# Altium footprint library MPD_BA4AAPC.PcbLib: 1 footprints
Each footprint in its own frame and in the unit in brackets; x right, y up, seen from the top. Pads: shape width x height; smd on the part's side, far side on the other; paste and mask are expansions set on the pad; w line width, h text height; cw(c..) or ccw(c..) is an arc to the next point about the centre after c.
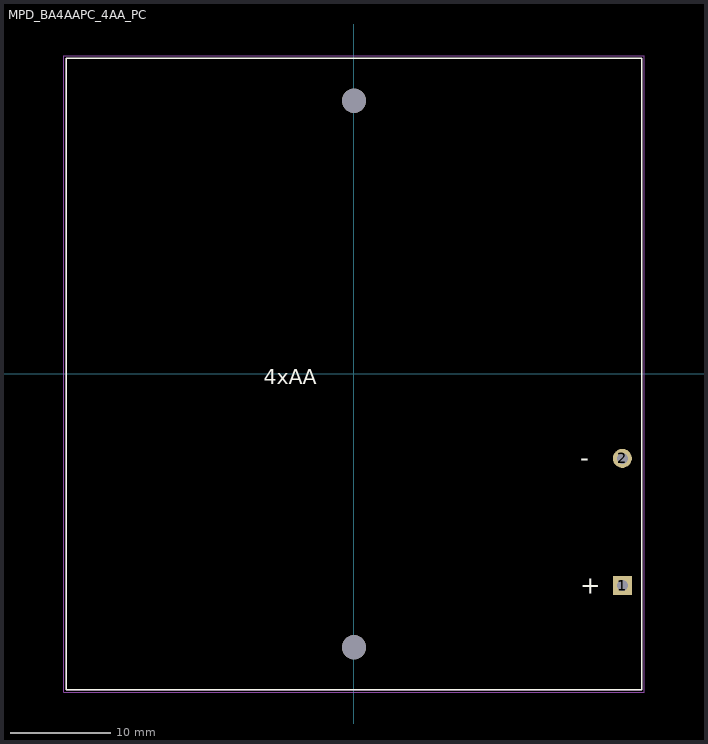
[diagram p0: the footprint, top view; thin cyan lines are the x and y axes]

## MPD_BA4AAPC_4AA_PC [mm] "MPD BA4AAPC 4xAA holder, PC pins (rev H PCB layout); pin 1 = pack +"
pads (4):
  rect 1.9x1.9 hole 1.1: 1(26.82,-21.135)
  round 1.9 hole 1.1: 2(26.82,-8.435)
  round 2.4 hole 2.4 unplated: ""(0,-27.305) ""(0,27.305)
Top Overlay:
  lines w0.15: -28.74,-31.545 -28.74,31.545 28.74,31.545 28.74,-31.545 -28.74,-31.545
  text "4xAA" at -9,-1 h1.5
  text "-" at 22.62,-9.235 h1.8
  text "+" at 22.62,-21.935 h1.8
Mechanical 1:
  lines w0.05: -28.99,-31.795 -28.99,31.795 28.99,31.795 28.99,-31.795 -28.99,-31.795
Mechanical 13:
  lines w0.1: -28.74,-31.545 -28.74,31.545 28.74,31.545 28.74,-31.545 -28.74,-31.545
3D body: height 15.88, standoff 0, extent -28.74,-31.545 28.74,31.545